# Altium schematic symbol library Batterie_components.SchLib: 88 symbols
Pins are listed as number, name and electrical type; pins without a type are passive.

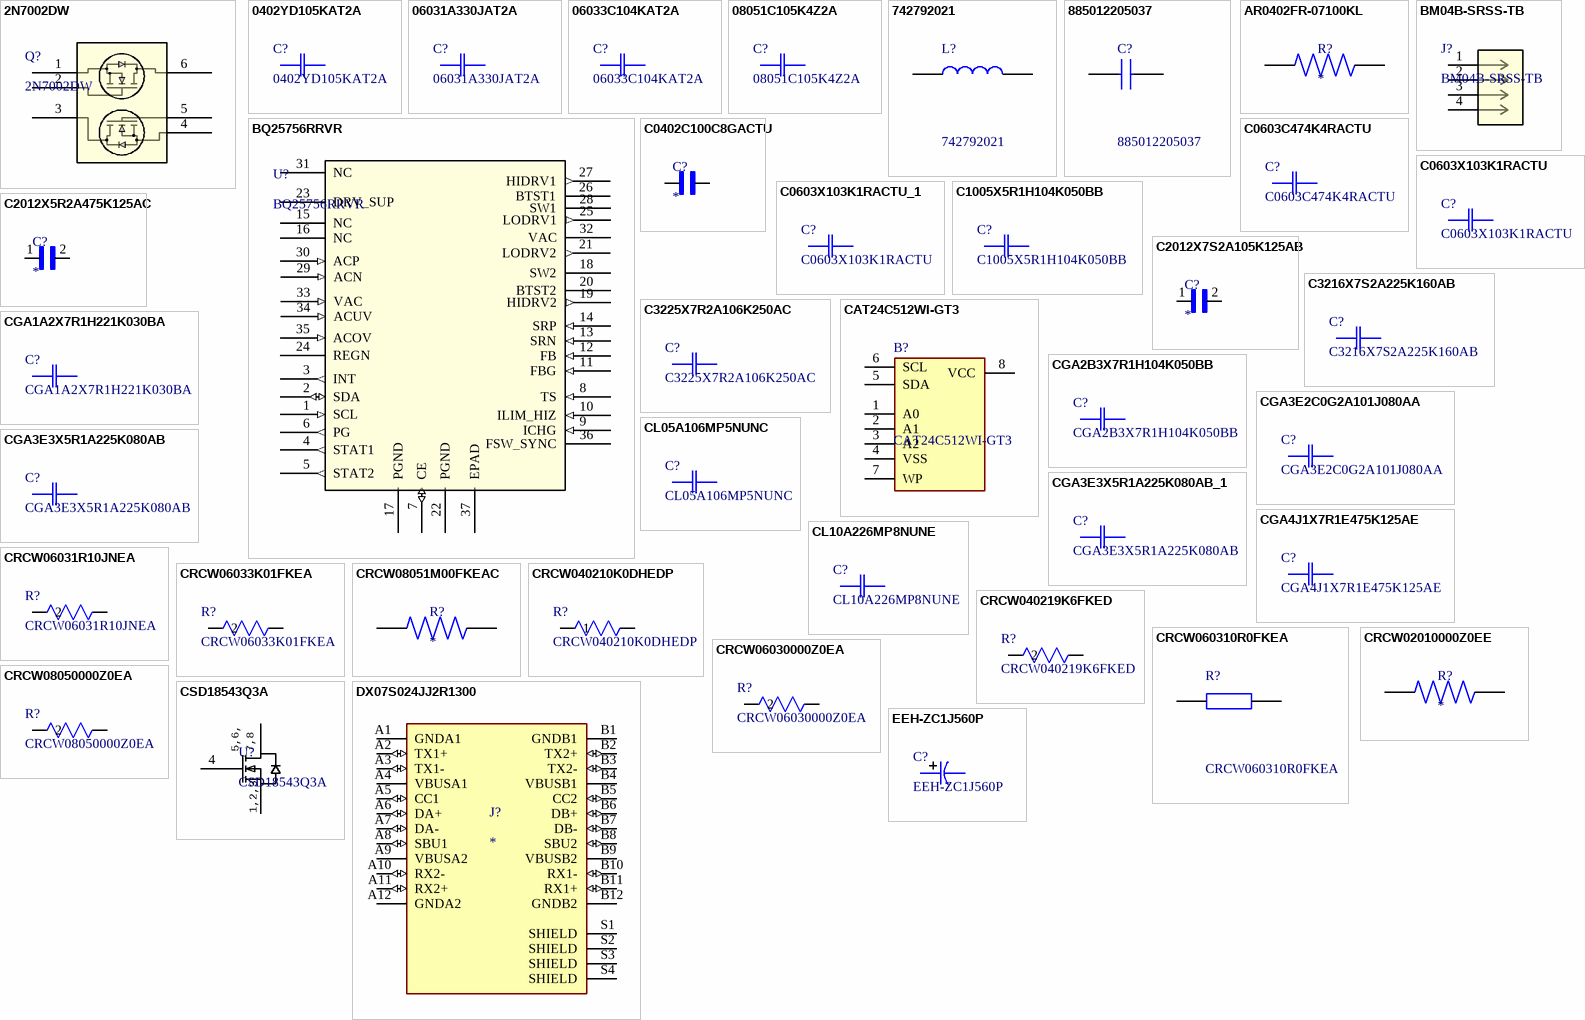
[diagram p0: symbols 2N7002DW to EEH-ZC1J560P]

## 2N7002DW
designator Q?
Description; Manufacturer_Name: onsemi; Copyright: Copyright (C) 2026 Ultra Librarian. All rights reserved.; Manufacturer_Part_Number: 2N7002DW; RefDes: RefDes; Type: Type
footprint SC-88SC70-6SOT-363_419B-02_ONS_OSI
pins: 1, 2, 3, 4, 5, 6

## 0402YD105KAT2A
designator C?
Description; Manufacturer_Name: KYOCERA AVX; Copyright: Copyright (C) 2025 Ultra Librarian. All rights reserved.; Manufacturer_Part_Number: 0402YD105KAT2A
footprint CAP_0402C_AVX
pins: 1, 2

## 06031A330JAT2A
designator C?
No Description Available; Manufacturer_Name: KYOCERA AVX; Copyright: Copyright (C) 2026 Ultra Librarian. All rights reserved.; Manufacturer_Part_Number: 06031A330JAT2A
footprint CAP_0603G_AVX
pins: 1, 2

## 06033C104KAT2A
designator C?
Description; Manufacturer_Name: KYOCERA AVX; Copyright: Copyright (C) 2025 Ultra Librarian. All rights reserved.; Manufacturer_Part_Number: 06033C104KAT2A
footprint 0603_AVX
pins: 1, 2

## 08051C105K4Z2A
designator C?
Description; Manufacturer_Name: KYOCERA AVX; Copyright: Copyright (C) 2025 Ultra Librarian. All rights reserved.; Manufacturer_Part_Number: 08051C105K4Z2A
footprint CAP_08051A0R8CAT2A_AVX
pins: 1, 2

## 742792021
designator L?
WE-CBF SMT EMI Suppression Ferrite Bead Size 0805; Z @ 100 MHz = 22 ; Zmax = 40  @ 1000 MHz; IR = 6000 mA; RDC = 0.008; Manufacturer_Name: Wurth Elektronik; Geometry.Height: 0.9mm; Mouser Part Number: 710-742792021; Mouser Price/Stock: https://www.mouser.co.uk/ProductDetail/Wurth-Elektronik/742792021?qs=kiEVtHyRaqCNMqCVVy4cvw%3D%3D; Manufacturer_Part_Number: 742792021; Datasheet Link: https://www.we-online.com/catalog/datasheet/742792021.pdf
footprint CAPC2012X90N
pins: 1, 2

## 885012205037
designator C?
WCAP-CSGP General Purpose MLCC X7R0402104K016DFCT10000; SMT Chip; 100 nF +/- 10%; 16 V(DC); -55C / +125C; size 0402; LxWxH 1.0 x 0.5 x 0.5; Term. Cu/Ni/Sn; Manufacturer_Name: Wurth Elektronik; Geometry.Height: 0.5mm; Mouser Part Number: 710-885012205037; Mouser Price/Stock: https://www.mouser.co.uk/ProductDetail/Wurth-Elektronik/885012205037?qs=0KOYDY2FL2%252B%2FS6qIxdvsOA%3D%3D; Manufacturer_Part_Number: 885012205037; Datasheet Link: https://www.we-online.com/catalog/datasheet/885012205037.pdf
footprint CAPC1005X50N
pins: 1, 2

## AR0402FR-07100KL
designator R?
100 kOhms Â±1% 0.063W, 1/16W Chip Resistor 0402 (1005 Metric) Moisture Resistant Thick Film; MF: Yageo; MP: AR0402FR-07100KL; SnapEDA_Link: https://www.snapeda.com/parts/AR0402FR-07100KL/Yageo/view-part/?ref=snap; Package: SMD-2 Yageo; Value: *; Check_prices: https://www.snapeda.com/parts/AR0402FR-07100KL/Yageo/view-part/?ref=eda
footprint RESC1005X40N
pins: 1, 2

## BM04B-SRSS-TB
designator J?
Description; Manufacturer_Name: JST; Type: Headers, Male Pins; Copyright: Copyright (C) 2025 Ultra Librarian. All rights reserved.; Manufacturer_Part_Number: BM04B-SRSS-TB; RefDes: RefDes
footprint CONN4_BM04B-SRSS_JST
pins: 1, 2, 3, 4

## BQ25756RRVR
designator U?
Stand-alone or I&sup2;C-controlled 70-V bidirectional buck-boost charge controller with MPPT 36-VQFN -40 to 125; Manufacturer_Name: Texas Instruments; Type: Interface; Copyright: Copyright (C) 2025 Ultra Librarian. All rights reserved.; Manufacturer_Part_Number: BQ25756RRVR; RefDes: RefDes
footprint VQFN36_RRV_TEX
pins: 1 SCL (in), 2 SDA (io), 3 INT (out), 4 STAT1 (out), 5 STAT2 (out), 6 PG (out), 7 CE (io), 8 TS (in), 9 ICHG (in), 10 ILIM_HIZ (in), 11 FBG (in), 12 FB (in), 13 SRN (in), 14 SRP (in), 15 NC, 16 NC, 17 PGND (power), 18 SW2 (power), 19 HIDRV2 (out), 20 BTST2 (power), 21 LODRV2 (out), 22 PGND (power), 23 DRV_SUP (power), 24 REGN (power), 25 LODRV1 (out), 26 BTST1 (power), 27 HIDRV1 (out), 28 SW1 (power), 29 ACN (in), 30 ACP (in), 31 NC, 32 VAC (power), 33 VAC (in), 34 ACUV (in), 35 ACOV (in), 36 FSW_SYNC (power), 37 EPAD (power)

## C0402C100C8GACTU
designator C?
ÐšÐµÑ€Ð°Ð¼Ð¸Ñ‡ÐµÑÐºÐ¸Ð¹ ÐºÐ¾Ð½Ð´ÐµÐ½ÑÐ°Ñ‚Ð¾Ñ€ 10 Ð¿Ð¤ Â±0,25 Ð¿Ð¤ 10 Ð’ C0G, NP0 0402 (1005 Ð¼ÐµÑ‚Ñ€Ð¸Ñ‡ÐµÑÐºÐ¸Ð¹); MF: KEMET; MP: C0402C100C8GACTU; SnapEDA_Link: https://www.snapeda.com/parts/C0402C100C8GACTU/KEMET/view-part/?ref=snap; Package: 1005 KEMET; Value: *; Check_prices: https://www.snapeda.com/parts/C0402C100C8GACTU/KEMET/view-part/?ref=eda
footprint CAPC1005X55N
pins: 1, 2

## C0603C474K4RACTU
designator C?
SMD Comm X7R, Ceramic, 0.47 uF, 10%, 16 VDC, X7R, SMD, MLCC, Temperature Stable, Class II, 0603; Manufacturer_Name: Kemet; Copyright: Copyright (C) 2026 Ultra Librarian. All rights reserved.; Manufacturer_Part_Number: C0603C474K4RACTU
footprint CAPC17595_87N_KEM
pins: 1, 2

## C0603X103K1RACTU
designator C?
SMD Comm X7R Flex, Ceramic, 0.01 uF, 10%, 100 VDC, X7R, SMD, MLCC, FT-CAP, Temperature Stable, 0603; Manufacturer_Name: Kemet; Copyright: Copyright (C) 2026 Ultra Librarian. All rights reserved.; Manufacturer_Part_Number: C0603X103K1RACTU; Datasheet: https://content.kemet.com/datasheets/KEM_C1013_X7R_FT-CAP_SMD.pdf
footprint CAPC17795_95N_KEM
pins: 1, 2

## C0603X103K1RACTU_1
designator C?, comment C0603X103K1RACTU
SMD Comm X7R Flex, Ceramic, 0.01 uF, 10%, 100 VDC, X7R, SMD, MLCC, FT-CAP, Temperature Stable, 0603; Manufacturer_Name: Kemet; Copyright: Copyright (C) 2026 Ultra Librarian. All rights reserved.; Manufacturer_Part_Number: C0603X103K1RACTU; Datasheet: https://content.kemet.com/datasheets/KEM_C1013_X7R_FT-CAP_SMD.pdf
footprint CAPC17795_95N_KEM
pins: 1, 2

## C1005X5R1H104K050BB
designator C?
Description; Manufacturer_Name: TDK; Copyright: Copyright (C) 2025 Ultra Librarian. All rights reserved.; Manufacturer_Part_Number: C1005X5R1H104K050BB
footprint CAP_1005_TDK
pins: 1, 2

## C2012X5R2A475K125AC
designator C?
MF: TDK; MP: C2012X5R2A475K125AC; SnapEDA_Link: https://www.snapeda.com/parts/C2012X5R2A475K125AC/TDK/view-part/?ref=snap; Package: 2012 TDK; Purchase-URL: https://pricing.snapeda.com/search/part/C2012X5R2A475K125AC/?ref=eda; Value: *; Check_prices: https://www.snapeda.com/parts/C2012X5R2A475K125AC/TDK/view-part/?ref=eda
footprint CAPC2012X150N
pins: 1, 2

## C2012X7S2A105K125AB
designator C?
1 ÂµF Â±10% 100V Ceramic Capacitor X7S 0805 (2012 Metric); MF: {'manufacturer': u'TDK Corporation'}; MP: C2012X7S2A105K125AB; Package: None; Price: None; Value: *; Availability: Unavailable
footprint CAPC2012X145N
pins: 1, 2

## C3216X7S2A225K160AB
designator C?
Description; Manufacturer_Name: TDK; Copyright: Copyright (C) 2025 Ultra Librarian. All rights reserved.; Manufacturer_Part_Number: C3216X7S2A225K160AB
footprint CAP_3216_TDK
pins: 1, 2

## C3225X7R2A106K250AC
designator C?
Description; Manufacturer_Name: TDK; Copyright: Copyright (C) 2025 Ultra Librarian. All rights reserved.; Manufacturer_Part_Number: C3225X7R2A106K250AC
footprint CAP_3225_TDK
pins: 1, 2

## CAT24C512WI-GT3
designator B?
Supports Standard, Fast and Fast-Plus I2C Protocol; 1.8 V to 5.5 V Supply Voltage Range; 128-Byte Page Write Buffer; Hardware Write Protection for Entire Memory; Schmitt Triggers and Noise Suppression Filters on I2C Bus Inputs (SCL and SDA); Low Power CMOS Technology; 1,000,000 Program/Erase Cycles; 100 Year Data Retention; Industrial Temperature Range; 8-lead SOIC and TSSOP and 8-pad UDFN packages; These Devices are Pb-Free, Halogen Free/BFR Free and are RoHS Compliant; Manufacturer_Name: onsemi; Geometry.Height: 1.75mm; Mouser Part Number: 863-CAT24C512WI-GT3; Mouser Price/Stock: https://www.mouser.co.uk/ProductDetail/onsemi/CAT24C512WI-GT3?qs=NJQfjRgVp6ROyXrGKjEjgQ%3D%3D; Manufacturer_Part_Number: CAT24C512WI-GT3; Datasheet Link: https://www.onsemi.com/pub/Collateral/CAT24C512-D.PDF
footprint SOIC127P600X175-8N
pins: 1 A0, 2 A1, 3 A2, 4 VSS, 5 SDA, 6 SCL, 7 WP, 8 VCC

## CGA1A2X7R1H221K030BA
designator C?
No Description Available; Manufacturer_Name: TDK; Copyright: Copyright (C) 2026 Ultra Librarian. All rights reserved.; Manufacturer_Part_Number: CGA1A2X7R1H221K030BA
footprint CAP_0603_TDK
pins: 1, 2

## CGA2B3X7R1H104K050BB
designator C?
Description; Manufacturer_Name: TDK; Copyright: Copyright (C) 2025 Ultra Librarian. All rights reserved.; Manufacturer_Part_Number: CGA2B3X7R1H104K050BB
footprint CAP_1005_TDK
pins: 1, 2

## CGA3E2C0G2A101J080AA
designator C?
No Description Available; Manufacturer_Name: TDK; Copyright: Copyright (C) 2026 Ultra Librarian. All rights reserved.; Manufacturer_Part_Number: CGA3E2C0G2A101J080AA
footprint CAP_1608_TDK
pins: 1, 2

## CGA3E3X5R1A225K080AB
designator C?
No Description Available; Manufacturer_Name: TDK; Copyright: Copyright (C) 2026 Ultra Librarian. All rights reserved.; Manufacturer_Part_Number: CGA3E3X5R1A225K080AB
footprint CAP_1608_TDK
pins: 1, 2

## CGA3E3X5R1A225K080AB_1
designator C?, comment CGA3E3X5R1A225K080AB
No Description Available; Manufacturer_Name: TDK; Copyright: Copyright (C) 2026 Ultra Librarian. All rights reserved.; Manufacturer_Part_Number: CGA3E3X5R1A225K080AB
footprint CAP_1608_TDK
pins: 1, 2

## CGA4J1X7R1E475K125AE
designator C?
Description; Manufacturer_Name: TDK; Copyright: Copyright (C) 2025 Ultra Librarian. All rights reserved.; Manufacturer_Part_Number: CGA4J1X7R1E475K125AE
footprint CAP_CGA4_TDK
pins: 1, 2

## CL05A106MP5NUNC
designator C?
CAPACITOR; SMT (0402); CERAMIC CHIP; 10UF; 10V; TOL=20%; TG=-55 DEGC TO +85 DEGC; TC=X5R; Manufacturer_Name: Samsung; Copyright: Copyright (C) 2025 Ultra Librarian. All rights reserved.; Manufacturer_Part_Number: CL05A106MP5NUNC
footprint CAP_CL05_SAM
pins: 1, 2

## CL10A226MP8NUNE
designator C?
Description; Manufacturer_Name: Samsung; Copyright: Copyright (C) 2025 Ultra Librarian. All rights reserved.; Manufacturer_Part_Number: CL10A226MP8NUNE
footprint CAP_CL10_SAM
pins: 1, 2

## CRCW06031R10JNEA
designator R?
D11/CRCW0603 200 1R1 5% ET1 e3; Manufacturer_Name: Vishay; Copyright: Copyright (C) 2026 Ultra Librarian. All rights reserved.; Manufacturer_Part_Number: CRCW06031R10JNEA; Datasheet: https://www.vishay.com/doc?20035
footprint RC0603N_VIS
pins: 1, 2

## CRCW06033K01FKEA
designator R?
D11/CRCW0603 100 3K01 1% ET1 e3; Manufacturer_Name: Vishay; Copyright: Copyright (C) 2025 Ultra Librarian. All rights reserved.; Manufacturer_Part_Number: CRCW06033K01FKEA
footprint RES_CRCW_0603
pins: 1, 2

## CRCW08051M00FKEAC
designator R?
MF: {'manufacturer': u'Vishay Dale'}; MP: CRCW08051M00FKEAC; Package: None; Price: None; Value: *; Availability: Unavailable
footprint RESC2012X60N
pins: 1, 2

## CRCW040210K0DHEDP
designator R?
D10/CRCW0402-P 50 10K 0.5% ET7 e3; Manufacturer_Name: Vishay; Copyright: Copyright (C) 2026 Ultra Librarian. All rights reserved.; Manufacturer_Part_Number: CRCW040210K0DHEDP
footprint RC0402N_VIS
pins: 1, 2

## CRCW040219K6FKED
designator R?
D10/CRCW0402 100 19K6 1% ET7 e3; Manufacturer_Name: Vishay; Copyright: Copyright (C) 2026 Ultra Librarian. All rights reserved.; Manufacturer_Part_Number: CRCW040219K6FKED
footprint RC0402N_VIS
pins: 1, 2

## CRCW060310R0FKEA
designator R?
CRCW0603 Resistor T/R 0.10W,1%,10R Vishay CRCW Series Thick Film Surface Mount Resistor 0603 Case 10Ohm ?1% 0.1W ?100ppm/?C; Geometry.Height: 0.5mm; Mouser Part Number: 71-CRCW0603-10-E3; Mouser Price/Stock: https://www.mouser.co.uk/ProductDetail/Vishay-Dale/CRCW060310R0FKEA?qs=wiO5jjUX9wsETsRLGnHNyA%3D%3D; Manufacturer_Name: Vishay; Manufacturer_Part_Number: CRCW060310R0FKEA; Datasheet Link: http://www.vishay.com/docs/20035/dcrcwe3.pdf
footprint RESC1608X50N
pins: 1, 2

## CRCW02010000Z0EE
designator R?
0 Ohms Jumper 0.05W, 1/20W Chip Resistor 0201 (0603 Metric) - Thick Film; MF: Vishay; MP: CRCW02010000Z0EE; SnapEDA_Link: https://www.snapeda.com/parts/CRCW02010000Z0EE/Vishay/view-part/?ref=snap; Package: 0603 Vishay; Value: *; Check_prices: https://www.snapeda.com/parts/CRCW02010000Z0EE/Vishay/view-part/?ref=eda
footprint RESC0603X28N
pins: 1, 2

## CRCW06030000Z0EA
designator R?
D11/CRCW0603 0R0 ET1 e3; Manufacturer_Name: Vishay; Copyright: Copyright (C) 2025 Ultra Librarian. All rights reserved.; Manufacturer_Part_Number: CRCW06030000Z0EA
footprint RC0603N_VIS
pins: 1, 2

## CRCW08050000Z0EA
designator R?
D12/CRCW0805 0R0 ET1 e3; Manufacturer_Name: Vishay; Copyright: Copyright (C) 2026 Ultra Librarian. All rights reserved.; Manufacturer_Part_Number: CRCW08050000Z0EA
footprint RES_CRCW_0805_VIS
pins: 1, 2

## CSD18543Q3A
designator U?
60-V, N channel NexFETâ„¢ power MOSFET, single SON 3 mm x 3 mm, 9.9 mOhm 8-VSONP -55 to 150; Manufacturer_Name: Texas Instruments; VALUE_2: Value; TYPE: TYPE; RefDes: RefDes; Copyright: Copyright (C) 2026 Ultra Librarian. All rights reserved.; Manufacturer_Part_Number: CSD18543Q3A
footprint DNH0008A
pins: 1 S, 2 S, 3 S, 4 G, 5 D, 6 D, 7 D, 8 D, 9 D
text: 5,6,; 7,8; 1,2,3

## DX07S024JJ2R1300
designator J?
USB-C (USB TYPE-C) USB 3.2 Gen 2 (USB 3.1 Gen 2, Superspeed + (USB 3.1)) Receptacle Connector 24 Position Surface Mount, Right Angle; Through Hole; MP: DX07S024JJ2R1300; MF: JAE Electronics; Check_prices: https://www.snapeda.com/parts/DX07S024JJ2R1300/JAE+Electronics/view-part/?ref=eda; Value: *; Purchase-URL: https://pricing.snapeda.com/search/part/DX07S024JJ2R1300/?ref=eda; SnapEDA_Link: https://www.snapeda.com/parts/DX07S024JJ2R1300/JAE+Electronics/view-part/?ref=snap; Package: None; Digi-Key_Part_Number: 670-2794-2-ND
footprint JAE_DX07S024JJ2R1300
pins: A1 GNDA1 (power), A2 TX1+ (io), A3 TX1- (io), A4 VBUSA1 (power), A5 CC1 (io), A6 DA+ (io), A7 DA- (io), A8 SBU1 (io), A9 VBUSA2 (power), A10 RX2- (io), A11 RX2+ (io), A12 GNDA2 (power), B1 GNDB1 (power), B2 TX2+ (io), B3 TX2- (io), B4 VBUSB1 (power), B5 CC2 (io), B6 DB+ (io), B7 DB- (io), B8 SBU2 (io), B9 VBUSB2 (power), B10 RX1- (io), B11 RX1+ (io), B12 GNDB2 (power), S1 SHIELD, S2 SHIELD, S3 SHIELD, S4 SHIELD

## EEH-ZC1J560P
designator C?
Description; Manufacturer_Name: Panasonic; Copyright: Copyright (C) 2025 Ultra Librarian. All rights reserved.; Manufacturer_Part_Number: EEH-ZC1J560P
footprint PCAP_EEHZ_G_PAN
pins: 1, 2

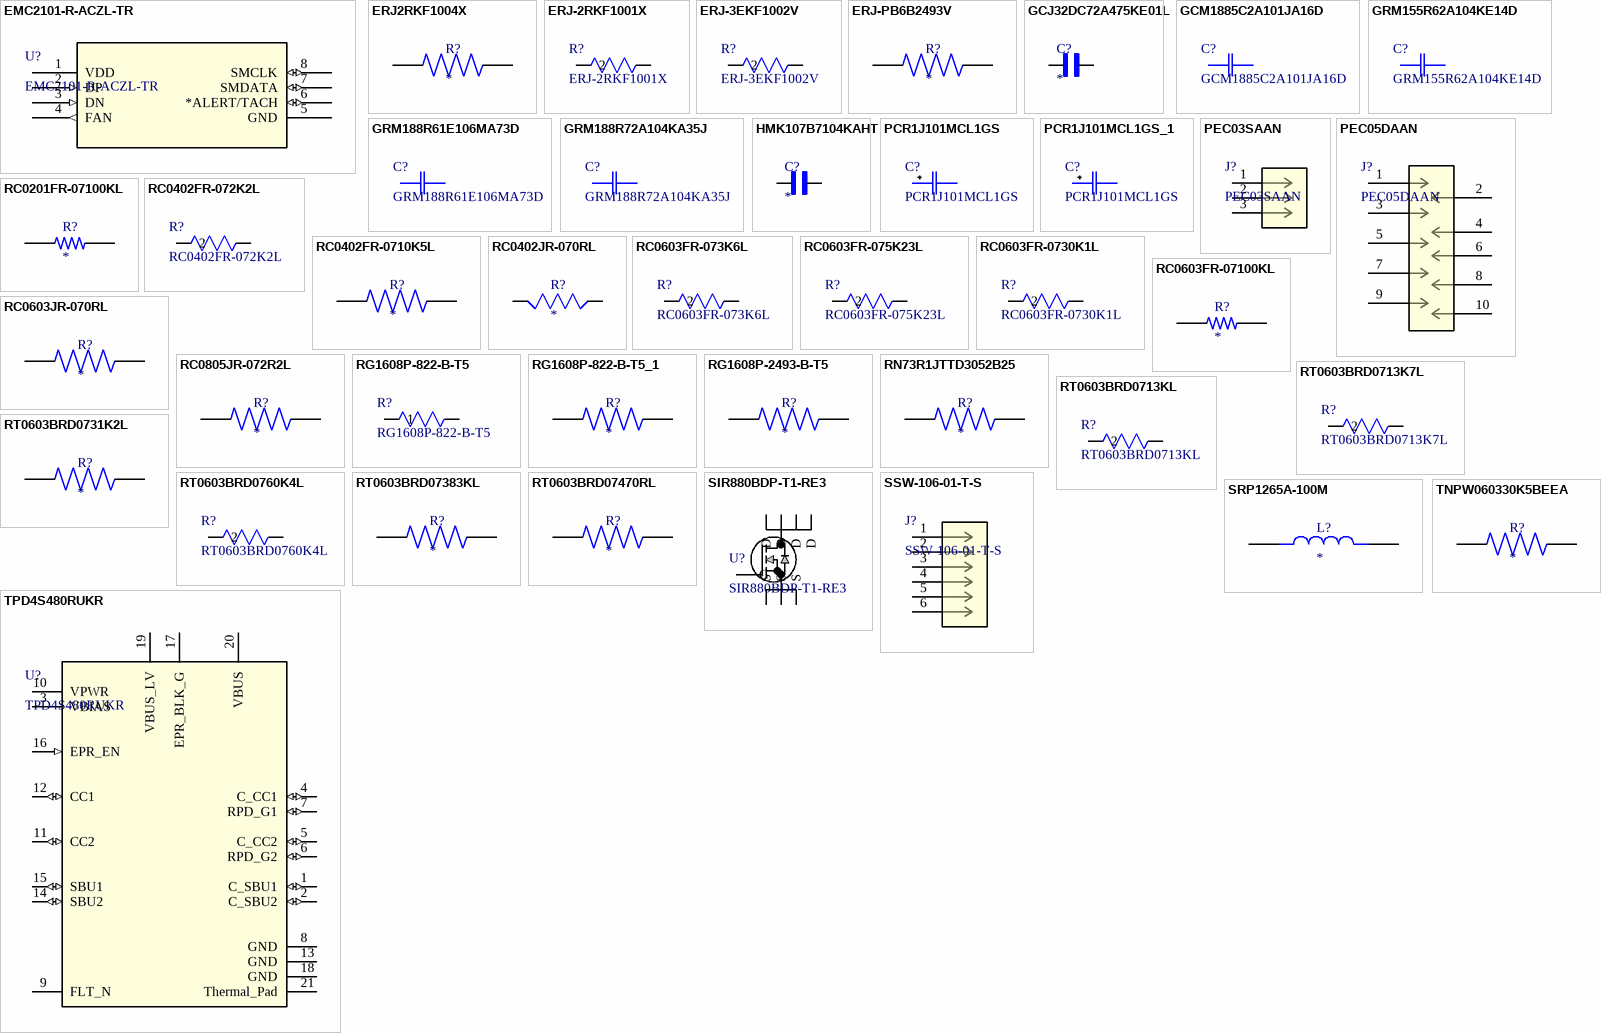
[diagram p1: symbols EMC2101-R-ACZL-TR to TPD4S480RUKR]

## EMC2101-R-ACZL-TR
designator U?
Description; Manufacturer_Name: Microchip; Copyright: Copyright (C) 2025 Ultra Librarian. All rights reserved.; Manufacturer_Part_Number: EMC2101-R-ACZL-TR; RefDes: RefDes; Type: Type
footprint MSOP8_MC_MCH
pins: 1 VDD (power), 2 DP (in), 3 DN (in), 4 FAN (out), 5 GND (power), 6 *ALERT/TACH (io), 7 SMDATA (io), 8 SMCLK (io)

## ERJ2RKF1004X
designator R?
1 MOhms 1% 0.1W, 1/10W Chip Resistor 0402 (1005 Metric) Automotive AEC-Q200 Thick Film; MF: Panasonic Electronic; MP: ERJ-2RKF1004X; SnapEDA_Link: https://www.snapeda.com/parts/ERJ-2RKF1004X/Panasonic+Electronic+Components/view-part/?ref=snap; Package: 1005-2 Panasonic; Value: *; Check_prices: https://www.snapeda.com/parts/ERJ-2RKF1004X/Panasonic+Electronic+Components/view-part/?ref=eda
footprint RES_ERJ2RKF1004X
pins: 1, 2

## ERJ-2RKF1001X
designator R?
RESISTOR; 0402; 1K OHM; 1%; 100PPM; 0.10W; THICK FILM; Manufacturer_Name: Panasonic; Copyright: Copyright (C) 2025 Ultra Librarian. All rights reserved.; Manufacturer_Part_Number: ERJ-2RKF1001X
footprint RC0402N_PAN
pins: 1, 2

## ERJ-3EKF1002V
designator R?
SMD-Resistor, 0603, 0,063W, 1%, 100ppm; Manufacturer_Name: Panasonic; Copyright: Copyright (C) 2025 Ultra Librarian. All rights reserved.; Manufacturer_Part_Number: ERJ-3EKF1002V
footprint RC0603N_PAN
pins: 1, 2

## ERJ-PB6B2493V
designator R?
MF: {'manufacturer': u'Panasonic Electronic Components'}; MP: ERJ-PB6B2493V; Package: None; Price: None; Value: *; Availability: Unavailable
footprint RES_ERJ-PB6B2493V
pins: 1, 2

## GCJ32DC72A475KE01L
designator C?
SMD Capacitor X7S(EIA) with Capacitance: 4.7uF Tol. 10%. Rated Voltage: 100Vdc; MF: Murata; MP: GCJ32DC72A475KE01L; SnapEDA_Link: https://www.snapeda.com/parts/GCJ32DC72A475KE01L/Murata/view-part/?ref=snap; Package: 3225 Murata; Value: *; Check_prices: https://www.snapeda.com/parts/GCJ32DC72A475KE01L/Murata/view-part/?ref=eda
footprint CAPC3225X230N
pins: 1, 2

## GCM1885C2A101JA16D
designator C?
Description; Manufacturer_Name: Murata; Copyright: Copyright (C) 2025 Ultra Librarian. All rights reserved.; Manufacturer_Part_Number: GCM1885C2A101JA16D
footprint G-188_MUR
pins: 1, 2

## GRM155R62A104KE14D
designator C?
Description; Manufacturer_Name: Murata; Copyright: Copyright (C) 2025 Ultra Librarian. All rights reserved.; Manufacturer_Part_Number: GRM155R62A104KE14D
footprint CAP_GRM155R62A104KE14D_MUR
pins: 1, 2

## GRM188R61E106MA73D
designator C?
Description; Manufacturer_Name: Murata; Type: Ceramic Capacitors; Copyright: Copyright (C) 2025 Ultra Librarian. All rights reserved.; Manufacturer_Part_Number: GRM188R61E106MA73D
footprint CAP_GRM18_1p8X1p1X1p1_MUR
pins: 1, 2

## GRM188R72A104KA35J
designator C?
CAP, CERM, 0.1 uF, 100 V, +/- 10%, X7R, 0603; Manufacturer_Name: Murata; Copyright: Copyright (C) 2026 Ultra Librarian. All rights reserved.; Manufacturer_Part_Number: GRM188R72A104KA35J
footprint G-188_MUR
pins: 1, 2

## HMK107B7104KAHT
designator C?
0.1 ÂµF Â±10% 100V Ceramic Capacitor X7R 0603 (1608 Metric); MF: Taiyo Yuden; MP: HMK107B7104KAHT; SnapEDA_Link: https://www.snapeda.com/parts/HMK107B7104KAHT/Taiyo+Yuden/view-part/?ref=snap; Package: 1608 Taiyo Yuden; Value: *; Check_prices: https://www.snapeda.com/parts/HMK107B7104KAHT/Taiyo+Yuden/view-part/?ref=eda
footprint CAPC1608X90N
pins: 1, 2

## PCR1J101MCL1GS
designator C?
Description; Manufacturer_Name: Nichicon; Copyright: Copyright (C) 2025 Ultra Librarian. All rights reserved.; Manufacturer_Part_Number: PCR1J101MCL1GS
footprint CAP_PC_10X12P7_NCH
pins: 1, 2

## PCR1J101MCL1GS_1
designator C?, comment PCR1J101MCL1GS
Description; Manufacturer_Name: Nichicon; Copyright: Copyright (C) 2025 Ultra Librarian. All rights reserved.; Manufacturer_Part_Number: PCR1J101MCL1GS
footprint CAP_PC_10X12P7_NCH
pins: 1, 2

## PEC03SAAN
designator J?
EVKIT PART-CONNECTOR; MALE; THROUGH HOLE; BREAKAWAY;; Manufacturer_Name: Sullins; Copyright: Copyright (C) 2026 Ultra Librarian. All rights reserved.; Manufacturer_Part_Number: PEC03SAAN; RefDes: RefDes; Type: Type
footprint CONN_PEC03SAAN_SUL
pins: 1, 2, 3

## PEC05DAAN
designator J?
CONNECTOR; MALE; THROUGH HOLE; BREAKAWAY; STRAIGHT; 10PINS; -65 DEGC TO +125 DEGC; Manufacturer_Name: Sullins; Copyright: Copyright (C) 2025 Ultra Librarian. All rights reserved.; Manufacturer_Part_Number: PEC05DAAN; RefDes: RefDes; Type: Type
footprint CONN_PEC05DAAN_SUL
pins: 1, 2, 3, 4, 5, 6, 7, 8, 9, 10

## RC0201FR-07100KL
designator R?
100 kOhms Â±1% 0.05W, 1/20W Chip Resistor 0201 (0603 Metric) Moisture Resistant Thick Film; MF: Yageo; MP: RC0201FR-07100KL; SnapEDA_Link: https://www.snapeda.com/parts/RC0201FR-07100KL/Yageo/view-part/?ref=snap; Package: 0201 Yageo; Value: *; Check_prices: https://www.snapeda.com/parts/RC0201FR-07100KL/Yageo/view-part/?ref=eda
footprint RESC0603X26N
pins: 1, 2

## RC0402FR-072K2L
designator R?
RES; SMT (0402); 2.2K; 1%; +/-100PPM/DEGC; 0.0630W; Manufacturer_Name: Yageo; Copyright: Copyright (C) 2025 Ultra Librarian. All rights reserved.; Manufacturer_Part_Number: RC0402FR-072K2L
footprint RC0402N_YAG
pins: 1, 2

## RC0402FR-0710K5L
designator R?
10.5 kOhms Â±1% 0.063W, 1/16W Chip Resistor 0402 (1005 Metric) Moisture Resistant Thick Film; MF: Yageo; MP: RC0402FR-0710K5L; SnapEDA_Link: https://www.snapeda.com/parts/RC0402FR-0710K5L/Yageo/view-part/?ref=snap; Package: 1005 Panasonic Electronic Components; Value: *; Check_prices: https://www.snapeda.com/parts/RC0402FR-0710K5L/Yageo/view-part/?ref=eda
footprint RESC1005X40N
pins: 1, 2

## RC0402JR-070RL
designator R?
0 Ohms Jumper 0.063W, 1/16W Chip Resistor 0402 (1005 Metric) Moisture Resistant Thick Film; MF: Yageo; MP: RC0402JR-070RL; Purchase-URL: https://pricing.snapeda.com/search/part/RC0402JR-070RL/?ref=eda; Package: 0402 Yageo; Digi-Key_Part_Number: 311-0.0JRTR-ND; Check_prices: https://www.snapeda.com/parts/RC0402JR-070RL/Yageo/view-part/?ref=eda; Value: *; SnapEDA_Link: https://www.snapeda.com/parts/RC0402JR-070RL/Yageo/view-part/?ref=snap
footprint RESC1005X40
pins: 1, 2

## RC0603FR-073K6L
designator R?
No Description Available; Manufacturer_Name: Yageo; Copyright: Copyright (C) 2026 Ultra Librarian. All rights reserved.; Manufacturer_Part_Number: RC0603FR-073K6L
footprint RC0603N_YAG
pins: 1, 2

## RC0603FR-075K23L
designator R?
Description; Manufacturer_Name: Yageo; Copyright: Copyright (C) 2025 Ultra Librarian. All rights reserved.; Manufacturer_Part_Number: RC0603FR-075K23L
footprint RC0603N_YAG
pins: 1, 2

## RC0603FR-0730K1L
designator R?
Description; Manufacturer_Name: Yageo; Copyright: Copyright (C) 2026 Ultra Librarian. All rights reserved.; Manufacturer_Part_Number: RC0603FR-0730K1L
footprint RC0603N_YAG
pins: 1, 2

## RC0603FR-07100KL
designator R?
100 kOhms Â±1% 0.1W, 1/10W Chip Resistor 0603 (1608 Metric) Moisture Resistant Thick Film; MF: Yageo; MP: RC0603FR-07100KL; SnapEDA_Link: https://www.snapeda.com/parts/RC0603FR-07100KL/Yageo/view-part/?ref=snap; Package: 0603 Yageo; Value: *; Check_prices: https://www.snapeda.com/parts/RC0603FR-07100KL/Yageo/view-part/?ref=eda
footprint RESC1607X60N
pins: 1, 2

## RC0603JR-070RL
designator R?
0 Ohms Jumper 0.1W, 1/10W Chip Resistor 0603 (1608 Metric) Moisture Resistant Thick Film; MF: Yageo; MP: RC0603JR-070RL; SnapEDA_Link: https://www.snapeda.com/parts/RC0603JR-070RL/Yageo/view-part/?ref=snap; Package: 0603 Yageo; Value: *; Check_prices: https://www.snapeda.com/parts/RC0603JR-070RL/Yageo/view-part/?ref=eda
footprint RESC1607X60N
pins: 1, 2

## RC0805JR-072R2L
designator R?
2.2 Ohms Â±5% 0.125W, 1/8W Chip Resistor 0805 (2012 Metric) Moisture Resistant Thick Film; MF: Yageo; MP: RC0805JR-072R2L; SnapEDA_Link: https://www.snapeda.com/parts/RC0805JR-072R2L/Yageo/view-part/?ref=snap; Package: 2012 Yageo; Value: *; Check_prices: https://www.snapeda.com/parts/RC0805JR-072R2L/Yageo/view-part/?ref=eda
footprint RESC2012X60N
pins: 1, 2

## RG1608P-822-B-T5
designator R?
No Description Available; Manufacturer_Name: Susumu; Copyright: Copyright (C) 2026 Ultra Librarian. All rights reserved.; Manufacturer_Part_Number: RG1608P-822-B-T5
footprint RES_0816_SUS
pins: 1, 2

## RG1608P-822-B-T5_1
designator R?
MP: RG1608P-822-B-T5; Package: None; Price: None; Value: *; Availability: Unavailable
footprint RESC1608X50N
pins: 1, 2

## RG1608P-2493-B-T5
designator R?
MP: RG1608P-2493-B-T5; Package: None; Price: None; Value: *; Availability: Unavailable
footprint RESC1608X50N
pins: 1, 2

## RN73R1JTTD3052B25
designator R?
MP: RN73R1JTTD3052B25; Package: None; Price: None; Value: *; Availability: Unavailable
footprint RESC1608X55N
pins: 1, 2

## RT0603BRD0713K7L
designator R?
No Description Available; Manufacturer_Name: Yageo; Copyright: Copyright (C) 2026 Ultra Librarian. All rights reserved.; Manufacturer_Part_Number: RT0603BRD0713K7L
footprint RC0603N_YAG
pins: 1, 2

## RT0603BRD0713KL
designator R?
No Description Available; Manufacturer_Name: Yageo; Copyright: Copyright (C) 2026 Ultra Librarian. All rights reserved.; Manufacturer_Part_Number: RT0603BRD0713KL
footprint RC0603N_YAG
pins: 1, 2

## RT0603BRD0731K2L
designator R?
31.2 kOhms Â±0.1% 0.1W, 1/10W Chip Resistor 0603 (1608 Metric) Thin Film; MF: Yageo; MP: RT0603BRD0731K2L; SnapEDA_Link: https://www.snapeda.com/parts/RT0603BRD0731K2L/Yageo/view-part/?ref=snap; Package: 1608 Yageo; Value: *; Check_prices: https://www.snapeda.com/parts/RT0603BRD0731K2L/Yageo/view-part/?ref=eda
footprint RESC1608X55N
pins: 1, 2

## RT0603BRD0760K4L
designator R?
No Description Available; Manufacturer_Name: Yageo; Copyright: Copyright (C) 2026 Ultra Librarian. All rights reserved.; Manufacturer_Part_Number: RT0603BRD0760K4L
footprint RC0603N_YAG
pins: 1, 2

## RT0603BRD07383KL
designator R?
383 kOhms Â±0.1% 0.1W, 1/10W Chip Resistor 0603 (1608 Metric) Thin Film; MF: Yageo; MP: RT0603BRD07383KL; SnapEDA_Link: https://www.snapeda.com/parts/RT0603BRD07383KL/Yageo/view-part/?ref=snap; Package: 1608 Yageo; Value: *; Check_prices: https://www.snapeda.com/parts/RT0603BRD07383KL/Yageo/view-part/?ref=eda
footprint RESC1608X55N
pins: 1, 2

## RT0603BRD07470RL
designator R?
RT Series 0603 0.1 W 470 Ohm Â±0.1 % Â±25 ppm/Â°C SMT Thin Film Chip Resistor; MF: Yageo; MP: RT0603BRD07470RL; SnapEDA_Link: https://www.snapeda.com/parts/RT0603BRD07470RL/Yageo/view-part/?ref=snap; Package: 1608 Yageo; Value: *; Check_prices: https://www.snapeda.com/parts/RT0603BRD07470RL/Yageo/view-part/?ref=eda
footprint RESC1608X55N
pins: 1, 2

## SIR880BDP-T1-RE3
designator U?
N-CHANNEL 80-V (D-S) MOSFET; Manufacturer_Name: Vishay; Copyright: Copyright (C) 2025 Ultra Librarian. All rights reserved.; Manufacturer_Part_Number: SIR880BDP-T1-RE3
footprint MOSFET_DP-T1-RE3_VIS
pins: 1 S, 2 S, 3 S, 4 G, 5 D, 6 D, 7 D, 8 D

## SRP1265A-100M
designator L?
MP: SRP1265A-100M; Package: None; Price: None; Value: *; Availability: Unavailable
footprint IND_SRP1265A-100M
pins: 1, 2

## SSW-106-01-T-S
designator J?
No Description Available; Manufacturer_Name: Samtec Inc; Copyright: Copyright (C) 2026 Ultra Librarian. All rights reserved.; Manufacturer_Part_Number: SSW-106-01-T-S; RefDes: RefDes; Type: Type
footprint CON6_1X6_TU_SSQ
pins: 1, 2, 3, 4, 5, 6

## TNPW060330K5BEEA
designator R?
MP: TNPW060330K5BEEA; Package: None; Price: None; Value: *; Availability: Unavailable
footprint RESC1508X55N
pins: 1, 2

## TPD4S480RUKR
designator U?
USB Type-Câ„¢ 48V EPR port protector with short-to-VBUS overvoltage and IEC ESD protection 20-WQFN -40 to 125; Manufacturer_Name: Texas Instruments; TYPE: TYPE; RefDes: RefDes; Copyright: Copyright (C) 2025 Ultra Librarian. All rights reserved.; Manufacturer_Part_Number: TPD4S480RUKR
footprint RUK0020B-IPC_A
pins: 1 C_SBU1 (io), 2 C_SBU2 (io), 3 VBIAS (power), 4 C_CC1 (io), 5 C_CC2 (io), 6 RPD_G2 (io), 7 RPD_G1 (io), 8 GND (power), 9 FLT_N (oc), 10 VPWR (power), 11 CC2 (io), 12 CC1 (io), 13 GND (power), 14 SBU2 (io), 15 SBU1 (io), 16 EPR_EN (in), 17 EPR_BLK_G, 18 GND (power), 19 VBUS_LV, 20 VBUS, 21 Thermal_Pad

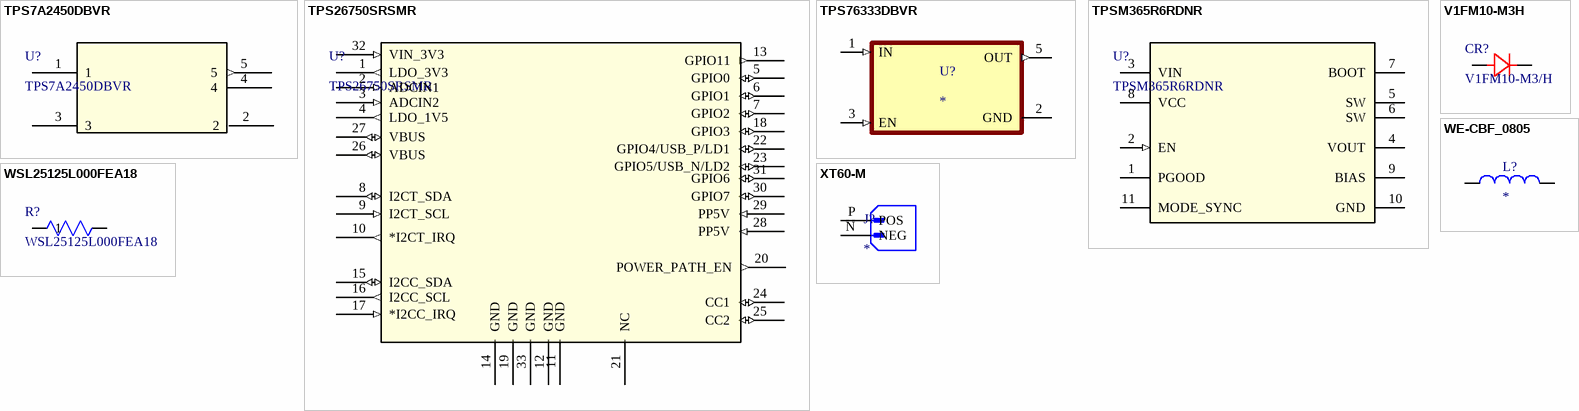
[diagram p2: symbols TPS7A2450DBVR to XT60-M]

## TPS7A2450DBVR
designator U?
200-mA, 18-V, ultra-low-IQ, low-dropout (LDO) voltage regulator with enable 5-SOT-23 -40 to 125; Manufacturer_Name: Texas Instruments; Copyright: Copyright (C) 2025 Ultra Librarian. All rights reserved.; Manufacturer_Part_Number: TPS7A2450DBVR; RefDes: RefDes; Type: Type
footprint SOT_50DBVR
pins: 1, 2 (power), 3, 4, 5 (out)

## TPS26750SRSMR
designator U?
USB Type-CÂ® and USB Power Delivery (PD) 3.1 controller with 240-W extended power range support  32-VQFN -40 to 125; Manufacturer_Name: Texas Instruments; Copyright: Copyright (C) 2025 Ultra Librarian. All rights reserved.; Manufacturer_Part_Number: TPS26750SRSMR; RefDes: RefDes; Type: Type
footprint VQFN32_RSM_TEX
pins: 1 LDO_3V3 (out), 2 ADCIN1 (in), 3 ADCIN2 (in), 4 LDO_1V5 (out), 5 GPIO0 (io), 6 GPIO1 (io), 7 GPIO2 (io), 8 I2CT_SDA (io), 9 I2CT_SCL (in), 10 *I2CT_IRQ (out), 11 GND (power), 12 GND (power), 13 GPIO11 (out), 14 GND (power), 15 I2CC_SDA (io), 16 I2CC_SCL (out), 17 *I2CC_IRQ (in), 18 GPIO3 (io), 19 GND (power), 20 POWER_PATH_EN (out), 21 NC, 22 GPIO4/USB_P/LD1 (io), 23 GPIO5/USB_N/LD2 (io), 24 CC1 (io), 25 CC2 (io), 26 VBUS (io), 27 VBUS (io), 28 PP5V (in), 29 PP5V (in), 30 GPIO7 (io), 31 GPIO6 (io), 32 VIN_3V3 (in), 33 GND (power)

## TPS76333DBVR
designator U?
150-mA, 10-V, low-dropout voltage regulator with enable; MF: Texas Instruments; MP: TPS76333DBVR; SnapEDA_Link: https://www.snapeda.com/parts/TPS76333DBVR/Texas+Instruments/view-part/?ref=snap; Package: SOT-23-5 Texas Instruments; Value: *; Check_prices: https://www.snapeda.com/parts/TPS76333DBVR/Texas+Instruments/view-part/?ref=eda
footprint SOT95P280X145-5N
pins: 1 IN (in), 2 GND (power), 3 EN (in), 5 OUT (out)

## TPSM365R6RDNR
designator U?
3-V to 65-V input, 1-V to 13-V output, 0.6-A synchronous buck converter power module 11-QFN-FCMOD -40 to 125; Manufacturer_Name: Texas Instruments; TYPE: TYPE; RefDes: RefDes; Copyright: Copyright (C) 2025 Ultra Librarian. All rights reserved.; Manufacturer_Part_Number: TPSM365R6RDNR
footprint RDN0011A-MFG
pins: 1 PGOOD (oc), 2 EN (in), 3 VIN (power), 4 VOUT, 5 SW, 6 SW, 7 BOOT, 8 VCC, 9 BIAS, 10 GND (power), 11 MODE_SYNC

## V1FM10-M3H
designator CR?, comment V1FM10-M3/H
1A,100V,SMF,TRENCH SKY RECT; Manufacturer_Name: Vishay; Copyright: Copyright (C) 2026 Ultra Librarian. All rights reserved.; Manufacturer_Part_Number: V1FM10-M3/H
footprint CR_SMF_DO-219AB_VIS
pins: 1 CATHODE, 2 ANODE

## WE-CBF_0805
designator L?
MF: {'manufacturer': u'W\xfcrth Elektronik'}; MP: 742792021; Package: None; Price: None; Value: *; Availability: Unavailable
footprint WE-CBF_0805_W4.0
pins: 1, 2

## WSL25125L000FEA18
designator R?
WSL-2512-18 .005 1% EA e3; Manufacturer_Name: Vishay; Copyright: Copyright (C) 2026 Ultra Librarian. All rights reserved.; Manufacturer_Part_Number: WSL25125L000FEA18; Datasheet: https://www.vishay.com/doc?31057
footprint WSL2512_VIS
pins: 1, 2

## XT60-M
designator J?
Plug; DC supply; XT60; male; PIN: 2; for cable; soldered; 30A; 500V; MF: AMASS; MP: XT60-M; SnapEDA_Link: https://www.snapeda.com/parts/XT60-M/AMASS/view-part/?ref=snap; Package: Package; Value: *; Check_prices: https://www.snapeda.com/parts/XT60-M/AMASS/view-part/?ref=eda
footprint AMASS_XT60-M
pins: N NEG, P POS